# Altium schematic symbol library bloo.SchLib: 25 symbols
Pins are listed as number, name and electrical type; pins without a type are passive.

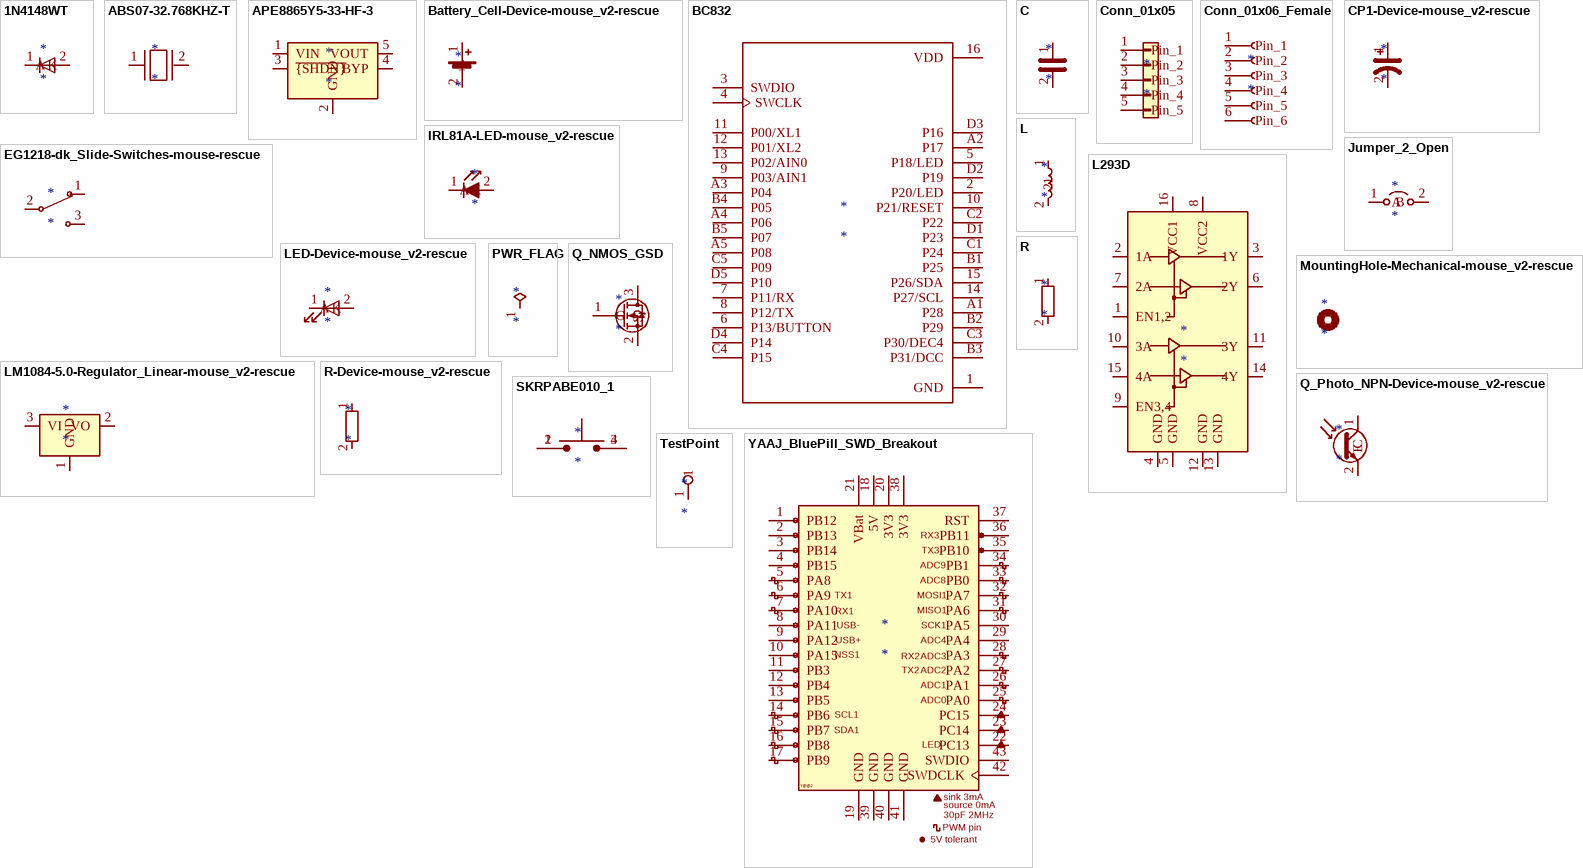
[diagram p0: symbols 1N4148WT to YAAJ_BluePill_SWD_Breakout]

## 1N4148WT
designator *
pins: 1 K, 2 A

## ABS07-32.768KHZ-T
designator *
pins: 1, 2

## APE8865Y5-33-HF-3
designator *
pins: 1 VIN, 2 GND, 3 ~{{SHDN}}, 4 BYP, 5 VOUT

## Battery_Cell-Device-mouse_v2-rescue
designator *
pins: 1 +, 2 -

## BC832
designator *
pins: 1 GND, 2 P20/LED, 3 SWDIO, 4 SWCLK, 5 P18/LED, 6 P13/BUTTON, 7 P11/RX, 8 P12/TX, 9 P03/AIN1, 10 P21/RESET, 11 P00/XL1, 12 P01/XL2, 13 P02/AIN0, 14 P27/SCL, 15 P26/SDA, 16 VDD, A1 P28, A2 P17, A3 P04, A4 P06, A5 P08, B1 P25, B2 P29, B3 P31/DCC, B4 P05, B5 P07, C1 P24, C2 P22, C3 P30/DEC4, C4 P15, C5 P09, D1 P23, D2 P19, D3 P16, D4 P14, D5 P10

## C
designator *
pins: 1, 2

## Conn_01x05
designator *
pins: 1 Pin_1, 2 Pin_2, 3 Pin_3, 4 Pin_4, 5 Pin_5

## Conn_01x06_Female
designator *
pins: 1 Pin_1, 2 Pin_2, 3 Pin_3, 4 Pin_4, 5 Pin_5, 6 Pin_6

## CP1-Device-mouse_v2-rescue
designator *
pins: 1, 2

## EG1218-dk_Slide-Switches-mouse-rescue
designator *
pins: 1, 2, 3

## IRL81A-LED-mouse_v2-rescue
designator *
pins: 1 K, 2 A

## Jumper_2_Open
designator *
pins: 1 A, 2 B

## L
designator *
pins: 1, 2

## L293D
designator *
pins: 1 EN1,2, 2 1A, 3 1Y, 4 GND, 5 GND, 6 2Y, 7 2A, 8 VCC2, 9 EN3,4, 10 3A, 11 3Y, 12 GND, 13 GND, 14 4Y, 15 4A, 16 VCC1

## LED-Device-mouse_v2-rescue
designator *
pins: 1 K, 2 A

## LM1084-5.0-Regulator_Linear-mouse_v2-rescue
designator *
pins: 1 GND, 2 VO, 3 VI

## MountingHole-Mechanical-mouse_v2-rescue
designator *

## PWR_FLAG
designator *  (graphical)
pins: 1

## Q_NMOS_GSD
designator *
pins: 1 G, 2 S, 3 D

## Q_Photo_NPN-Device-mouse_v2-rescue
designator *
pins: 1 C, 2 E

## R
designator *
pins: 1, 2

## R-Device-mouse_v2-rescue
designator *
pins: 1, 2

## SKRPABE010_1
designator *
pins: 1, 2, 3, 4

## TestPoint
designator *
pins: 1

## YAAJ_BluePill_SWD_Breakout
designator *
pins: 1 PB12, 2 PB13, 3 PB14, 4 PB15, 5 PA8, 6 PA9, 7 PA10, 8 PA11, 9 PA12, 10 PA15, 11 PB3, 12 PB4, 13 PB5, 14 PB6, 15 PB7, 16 PB8, 17 PB9, 18 5V, 19 GND, 20 3V3, 21 VBat, 22 PC13, 23 PC14, 24 PC15, 25 PA0, 26 PA1, 27 PA2, 28 PA3, 29 PA4, 30 PA5, 31 PA6, 32 PA7, 33 PB0, 34 PB1, 35 PB10, 36 PB11, 37 RST, 38 3V3, 39 GND, 40 GND, 41 GND, 42 SWDCLK, 43 SWDIO
text: RX3; TX3; ADC9; ADC8; TX1; MOSI1; RX1; MISO1; USB-; SCK1; USB+; ADC4; NSS1; RX2; ADC3; TX2; ADC2; ADC1; ADC0; SCL1; SDA1; LED; Y@@J; sink 3mA; source 0mA; 30pF 2MHz; PWM pin; 5V tolerant